# EAGLE library part BN42-1502_BRIDGE (library HansToroid)
BN43-202 SWR bridge
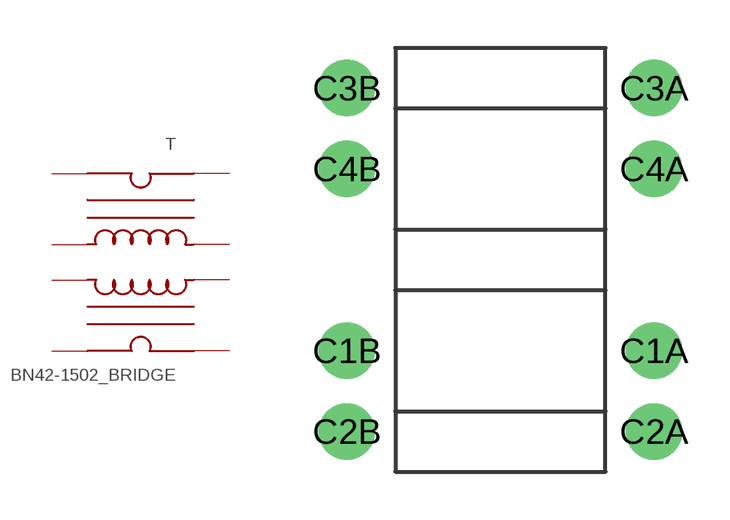
[diagram p5: symbol with the pads of BN43-1502_BRIDGE; footprint BN43-1502_BRIDGE]

Designator prefix T

## BN42-1502_BRIDGE1502  [BN43-1502_BRIDGE]
C1A  C1A
C1B  C1B
C2A  C2A
C2B  C2B
C3A  C3A
C3B  C3B
C4A  C4A
C4B  C4B

## Footprint BN43-1502_BRIDGE (pad centres in mm)
Transformer on T50 Core, having two windings.
drill 0.9 pad 1.778: C1A 4.826,-2.857; C1B -4.826,-2.857; C4A 4.826,2.857; C4B -4.826,2.857
drill 0.6 pad 1.778: C2A 4.826,-5.397; C2B -4.826,-5.397; C3A 4.826,5.397; C3B -4.826,5.397